# Altium integrated library Oscilator.IntLib: 1 symbol
Pins are listed as number, name and electrical type; pins without a type are passive.

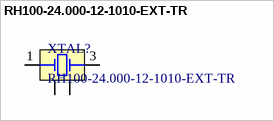
[diagram p0: symbol RH100-24.000-12-1010-EXT-TR]

## RH100-24.000-12-1010-EXT-TR
designator XTAL?
Crystal, 24Mhz, 12Pf, Smd, 3.2Mm X 2.5Mm Rohs Compliant: Yes |Raltron RH100-24.000-12-1010-EXT-TR; Manufacturer: Raltron Electronics; Value: 24000000; Purpose Of Usage: BASIC; Supplier: Digikey; Supplier Part Number 1: 2151-RH100-24.000-12-1010-EXT-TRCT-ND; Manufacturer Part Number: RH100-24.000-12-1010-EXT-TR; RoHS: No; Category: OSCILATOR; Stock: 6000; Case/Package: 3.2 x 2.4; Max Operating Temperature: +85; Min Operating Temperature: -40; Mount: SMD; Stock ID: ??; Sub-Category: CRYSTAL; Supplier 1: Digi-Key
footprint WE-XTAL_CFPX-180 (Quartz Crystal, size CFPX-180, body 3.4x2.7mm)
pins: 1 Crystal, 2 GND & Lid, 3 Crystal, 4 GND & Lid